# Altium integrated library 400LEX3P9MEFC10X12P5.IntLib: 1 symbol
Pins are listed as number, name and electrical type; pins without a type are passive.

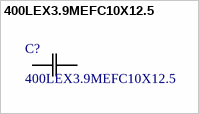
[diagram p0: symbol 400LEX3.9MEFC10X12.5]

## 400LEX3.9MEFC10X12.5
designator C?
No Description Available; Manufacturer_Name: Rubycon; Copyright: Copyright (C) 2026 Ultra Librarian. All rights reserved.; Manufacturer_Part_Number: 400LEX3.9MEFC10X12.5
footprint CAP_L_10X12P5_RUB
pins: 1, 2